# Altium footprint library fin-microphone.PcbLib: 4 footprints
Each footprint in its own frame and in the unit in brackets; x right, y up, seen from the top. Pads: shape width x height; smd on the part's side, far side on the other; paste and mask are expansions set on the pad; w line width, h text height; cw(c..) or ccw(c..) is an arc to the next point about the centre after c.
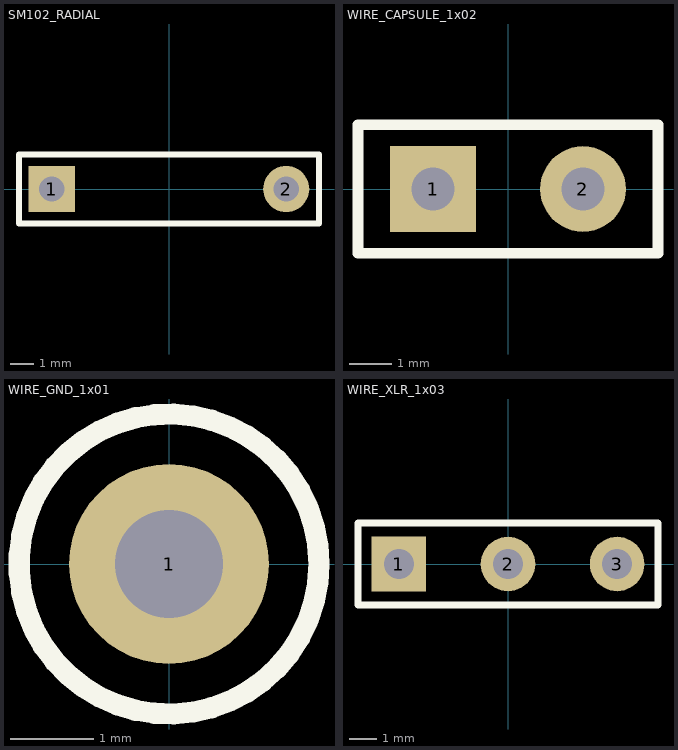
[diagram p0: the footprints below, top view; thin cyan lines are the x and y axes]

## SM102_RADIAL [mm] "Ohmite Slim-Mox SM102, radial, pitch 10.16mm"
height 8.6
pads (2):
  rect 2x2 hole 1.1: 1(-5.08,0)
  round 2 hole 1.1: 2(5.08,0)
Top Overlay:
  lines w0.254: -6.5,-1.5 6.5,-1.5 6.5,1.5 -6.5,1.5 -6.5,-1.5

## WIRE_CAPSULE_1x02 [mm]
pads (2):
  rect 2x2 hole 1: 1(-1.75,0)
  round 2 hole 1: 2(1.75,0)
Top Overlay:
  lines w0.254: -3.5,-1.5 -3.5,1.5 3.5,1.5 3.5,-1.5 -3.5,-1.5

## WIRE_GND_1x01 [mm]
pads (1):
  round 2.4 hole 1.3: 1(0,0)
Top Overlay:
  circle w0.254: c0,0 r1.803

## WIRE_XLR_1x03 [mm]
pads (3):
  rect 2x2 hole 1.1: 1(-4,0)
  round 2 hole 1.1: 2(0,0) 3(4,0)
Top Overlay:
  lines w0.254: -5.5,-1.5 5.5,-1.5 5.5,1.5 -5.5,1.5 -5.5,-1.5